# EAGLE library part SSSS820501 (library SSSS820501)
Slide Switches DP3T VERT GND 1.5mm Source: Datasheet <https://www.alps.com/prod/info/E/HTML/Switch/Slide/SSSS8/SSSS820501.html>
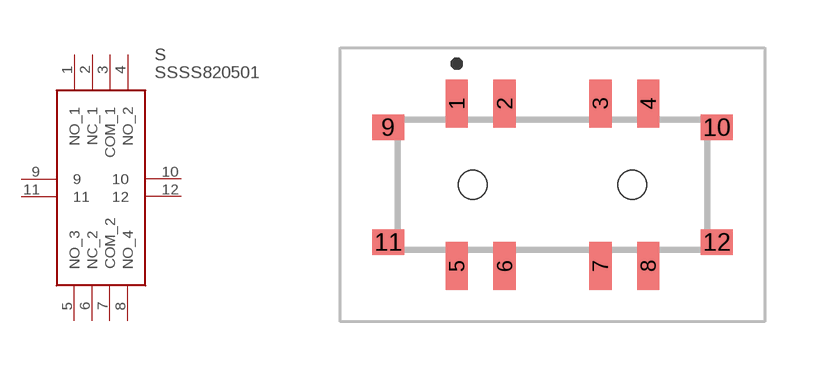
[diagram p0: symbol with the pads of SSSS820501; footprint SSSS820501]

Designator prefix S

## SSSS820501 (Description: Slide Switches DP3T VERT GND 1.5mm; Height: 1.6mm; Manufacturer_Name: ALPS Electric; Manufacturer_Part_Number: SSSS820501; Mouser_Part_Number: 688-SSSS820501; Mouser_Price-Stock: https://www.mouser.co.uk/ProductDetail/ALPS/SSSS820501?qs=N5Jky1br14OXv4vkkV%252B%252B4A%3D%3D)  [SSSS820501]
1  NO_1
2  NC_1
3  COM_1
4  NO_2
5  NO_3
6  NC_2
7  COM_2
8  NO_4
9  9
10  10
11  11
12  12

## Footprint SSSS820501 (pad centres in mm)
SSSS820501-2
smd 0.7 x 1.5: 1 -3,2.55; 2 -1.5,2.55; 3 1.5,2.55; 4 3,2.55; 5 -3,-2.55; 6 -1.5,-2.55; 7 1.5,-2.55; 8 3,-2.55
smd 1 x 0.8: 9 -5.15,1.8; 10 5.15,1.8; 11 -5.15,-1.8; 12 5.15,-1.8
hole 0.9 at -2.5,0
hole 0.9 at 2.5,0